# Altium footprint library QuarterBridge_RevK.PcbLib: 5 footprints
Each footprint in its own frame and in the unit in brackets; x right, y up, seen from the top. Pads: shape width x height; smd on the part's side, far side on the other; paste and mask are expansions set on the pad; w line width, h text height; cw(c..) or ccw(c..) is an arc to the next point about the centre after c.
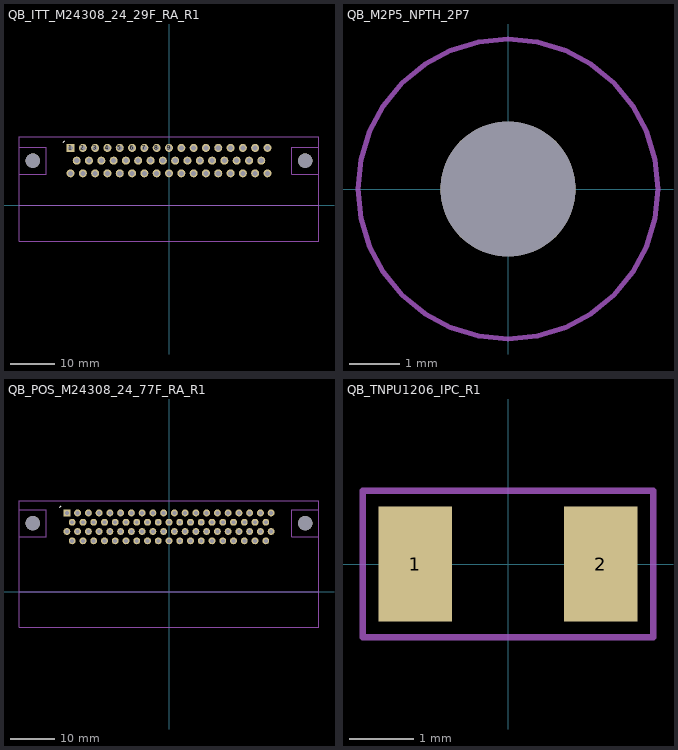
[diagram p0: the footprints below, top view; thin cyan lines are the x and y axes]

## PCBComponent_1 [mm]

## QB_ITT_M24308_24_29F_RA_R1 [mm] "Rev E physical trial; rear flange origin; mating -Y; NPTH mounting isolated from AGND"
height 16
pads (52):
  rect 1.8x1.8 hole 1.14 paste-2539.97 mask+0.075: 1(-22.098,12.878)
  round 1.8 hole 1.14 paste-2539.97 mask+0.075: 2(-19.329,12.878) 3(-16.561,12.878) 4(-13.818,12.878) 5(-11.049,12.878) 6(-8.28,12.878) 7(-5.537,12.878) 8(-2.769,12.878) 9(0,12.878) 10(2.769,12.878) 11(5.537,12.878) 12(8.28,12.878) 13(11.049,12.878) 14(13.818,12.878) 15(16.561,12.878) 16(19.329,12.878) 17(22.098,12.878) 18(-20.701,10.033) 19(-17.958,10.033) 20(-15.189,10.033) 21(-12.421,10.033) 22(-9.677,10.033) 23(-6.909,10.033) 24(-4.14,10.033) 25(-1.397,10.033) 26(1.397,10.033) 27(4.14,10.033) 28(6.909,10.033) 29(9.677,10.033) 30(12.421,10.033) 31(15.189,10.033) 32(17.958,10.033) 33(20.701,10.033) 34(-22.098,7.188) 35(-19.329,7.188) 36(-16.561,7.188) 37(-13.818,7.188) 38(-11.049,7.188) 39(-8.28,7.188) 40(-5.537,7.188) 41(-2.769,7.188) 42(0,7.188) 43(2.769,7.188) 44(5.537,7.188) 45(8.28,7.188) 46(11.049,7.188) 47(13.818,7.188) 48(16.561,7.188) 49(19.329,7.188) 50(22.098,7.188)
  round 3.2 hole 3.2 unplated paste-2539.97 mask+0: ""(-30.556,10.033) ""(30.556,10.033)
Top Overlay:
  lines w0.15: -23.698,14.178 -23.398,14.478
Mechanical 1:
  lines w0.25: -33.655,0 33.655,0
Mechanical 13:
  lines w0.15: -33.655,0 -33.655,15.34 33.655,15.34 33.655,0 -33.655,0
Mechanical 14:
  lines w0.1: -33.655,-8 -33.655,0 33.655,0 33.655,-8 -33.655,-8
Mechanical 15:
  lines w0.1: -33.556,7.033 -33.556,13.033 -27.556,13.033 -27.556,7.033 -33.556,7.033 ; 27.556,7.033 27.556,13.033 33.556,13.033 33.556,7.033 27.556,7.033
3D body "J1_M24308_24-29F_reference.step": height 15.09, standoff -3.5, extent -33.465,-6.44 33.465,15.34

## QB_M2P5_NPTH_2P7 [mm] "Rev E physical trial; rear flange origin; mating -Y; NPTH mounting isolated from AGND"
pads (1):
  round 2.7 hole 2.7 unplated paste-2539.97 mask+0: ""(0,0)
Mechanical 15:
  lines w0.1: -3,0 -2.942,0.585 -2.772,1.148 -2.494,1.667 -2.121,2.121 -1.667,2.494 -1.148,2.772 -0.585,2.942 0,3 0.585,2.942 1.148,2.772 1.667,2.494 2.121,2.121 2.494,1.667 2.772,1.148 2.942,0.585 3,0 2.942,-0.585 2.772,-1.148 2.494,-1.667 2.121,-2.121 1.667,-2.494 1.148,-2.772 0.585,-2.942 0,-3 -0.585,-2.942 -1.148,-2.772 -1.667,-2.494 -2.121,-2.121 -2.494,-1.667 -2.772,-1.148 -2.942,-0.585 -3,0

## QB_POS_M24308_24_77F_RA_R1 [mm] "Rev E physical trial; rear flange origin; mating -Y; NPTH mounting isolated from AGND"
height 16
pads (80):
  rect 1.55x1.55 hole 0.89 paste-2539.97 mask+0.075: 1(-22.924,17.678)
  round 1.55 hole 0.89 paste-2539.97 mask+0.075: 2(-20.511,17.678) 3(-18.098,17.678) 4(-15.684,17.678) 5(-13.271,17.678) 6(-10.858,17.678) 7(-8.445,17.678) 8(-6.032,17.678) 9(-3.619,17.678) 10(-1.206,17.678) 11(1.206,17.678) 12(3.619,17.678) 13(6.032,17.678) 14(8.445,17.678) 15(10.858,17.678) 16(13.271,17.678) 17(15.684,17.678) 18(18.098,17.678) 19(20.511,17.678) 20(22.924,17.678) 21(-21.717,15.596) 22(-19.304,15.596) 23(-16.891,15.596) 24(-14.478,15.596) 25(-12.065,15.596) 26(-9.652,15.596) 27(-7.239,15.596) 28(-4.826,15.596) 29(-2.413,15.596) 30(0,15.596) 31(2.413,15.596) 32(4.826,15.596) 33(7.239,15.596) 34(9.652,15.596) 35(12.065,15.596) 36(14.478,15.596) 37(16.891,15.596) 38(19.304,15.596) 39(21.717,15.596) 40(-22.924,13.513) 41(-20.511,13.513) 42(-18.098,13.513) 43(-15.684,13.513) 44(-13.271,13.513) 45(-10.858,13.513) 46(-8.445,13.513) 47(-6.032,13.513) 48(-3.619,13.513) 49(-1.206,13.513) 50(1.206,13.513) 51(3.619,13.513) 52(6.032,13.513) 53(8.445,13.513) 54(10.858,13.513) 55(13.271,13.513) 56(15.684,13.513) 57(18.098,13.513) 58(20.511,13.513) 59(22.924,13.513) 60(-21.717,11.43) 61(-19.304,11.43) 62(-16.891,11.43) 63(-14.478,11.43) 64(-12.065,11.43) 65(-9.652,11.43) 66(-7.239,11.43) 67(-4.826,11.43) 68(-2.413,11.43) 69(0,11.43) 70(2.413,11.43) 71(4.826,11.43) 72(7.239,11.43) 73(9.652,11.43) 74(12.065,11.43) 75(14.478,11.43) 76(16.891,11.43) 77(19.304,11.43) 78(21.717,11.43)
  round 3.2 hole 3.2 unplated paste-2539.97 mask+0: ""(-30.556,15.392) ""(30.556,15.392)
Top Overlay:
  lines w0.15: -24.523,18.978 -24.223,19.278 -24.523,18.978
Mechanical 1:
  lines w0.25: -33.655,0 33.655,0 -33.655,0
Mechanical 13:
  lines w0.15: -33.655,0 -33.655,20.45 ; -33.655,0 33.655,0 ; -33.655,0 -33.655,20.45 ; -33.655,0 33.655,0 ; -33.655,20.45 33.655,20.45 ; -33.655,20.45 33.655,20.45 ; 33.655,0 33.655,20.45 ; 33.655,0 33.655,20.45
Mechanical 14:
  lines w0.1: -33.655,-8 -33.655,0 ; -33.655,-8 33.655,-8 ; -33.655,-8 -33.655,0 ; -33.655,-8 33.655,-8 ; -33.655,0 33.655,0 ; -33.655,0 33.655,0 ; 33.655,-8 33.655,0 ; 33.655,-8 33.655,0
Mechanical 15:
  lines w0.1: -33.556,12.392 -33.556,18.392 ; -33.556,12.392 -27.556,12.392 ; -33.556,12.392 -33.556,18.392 ; -33.556,12.392 -27.556,12.392 ; -33.556,18.392 -27.556,18.392 ; -33.556,18.392 -27.556,18.392 ; -27.556,12.392 -27.556,18.392 ; -27.556,12.392 -27.556,18.392 ; 27.556,12.392 27.556,18.392 ; 27.556,12.392 33.556,12.392 ; 27.556,12.392 27.556,18.392 ; 27.556,12.392 33.556,12.392 ; 27.556,18.392 33.556,18.392 ; 27.556,18.392 33.556,18.392 ; 33.556,12.392 33.556,18.392 ; 33.556,12.392 33.556,18.392
3D body "J2_M24308_24-77F_reference.step": height 15.37, standoff -3.21, extent -33.465,-6.83 33.465,20.066

## QB_TNPU1206_IPC_R1 [mm] "Vishay doc28950 p1 IPC7351 reflow 1206; G1.75 Y1.15 X1.80 Z4.05 mm"
height 0.65
pads (2):
  rect 1.15x1.8 smd: 1(-1.45,0) 2(1.45,0)
Mechanical 1:
  lines w0.102: -2.275,-1.15 -2.275,1.15 2.275,1.15 2.275,-1.15 -2.275,-1.15
3D body "TNPU1206_reference.step": height 0.55, standoff 0, extent -1.6,-0.8 1.6,0.8